# Altium schematic symbol library MY_LIB_Connectors.SchLib: 177 symbols (part 4 of 4)
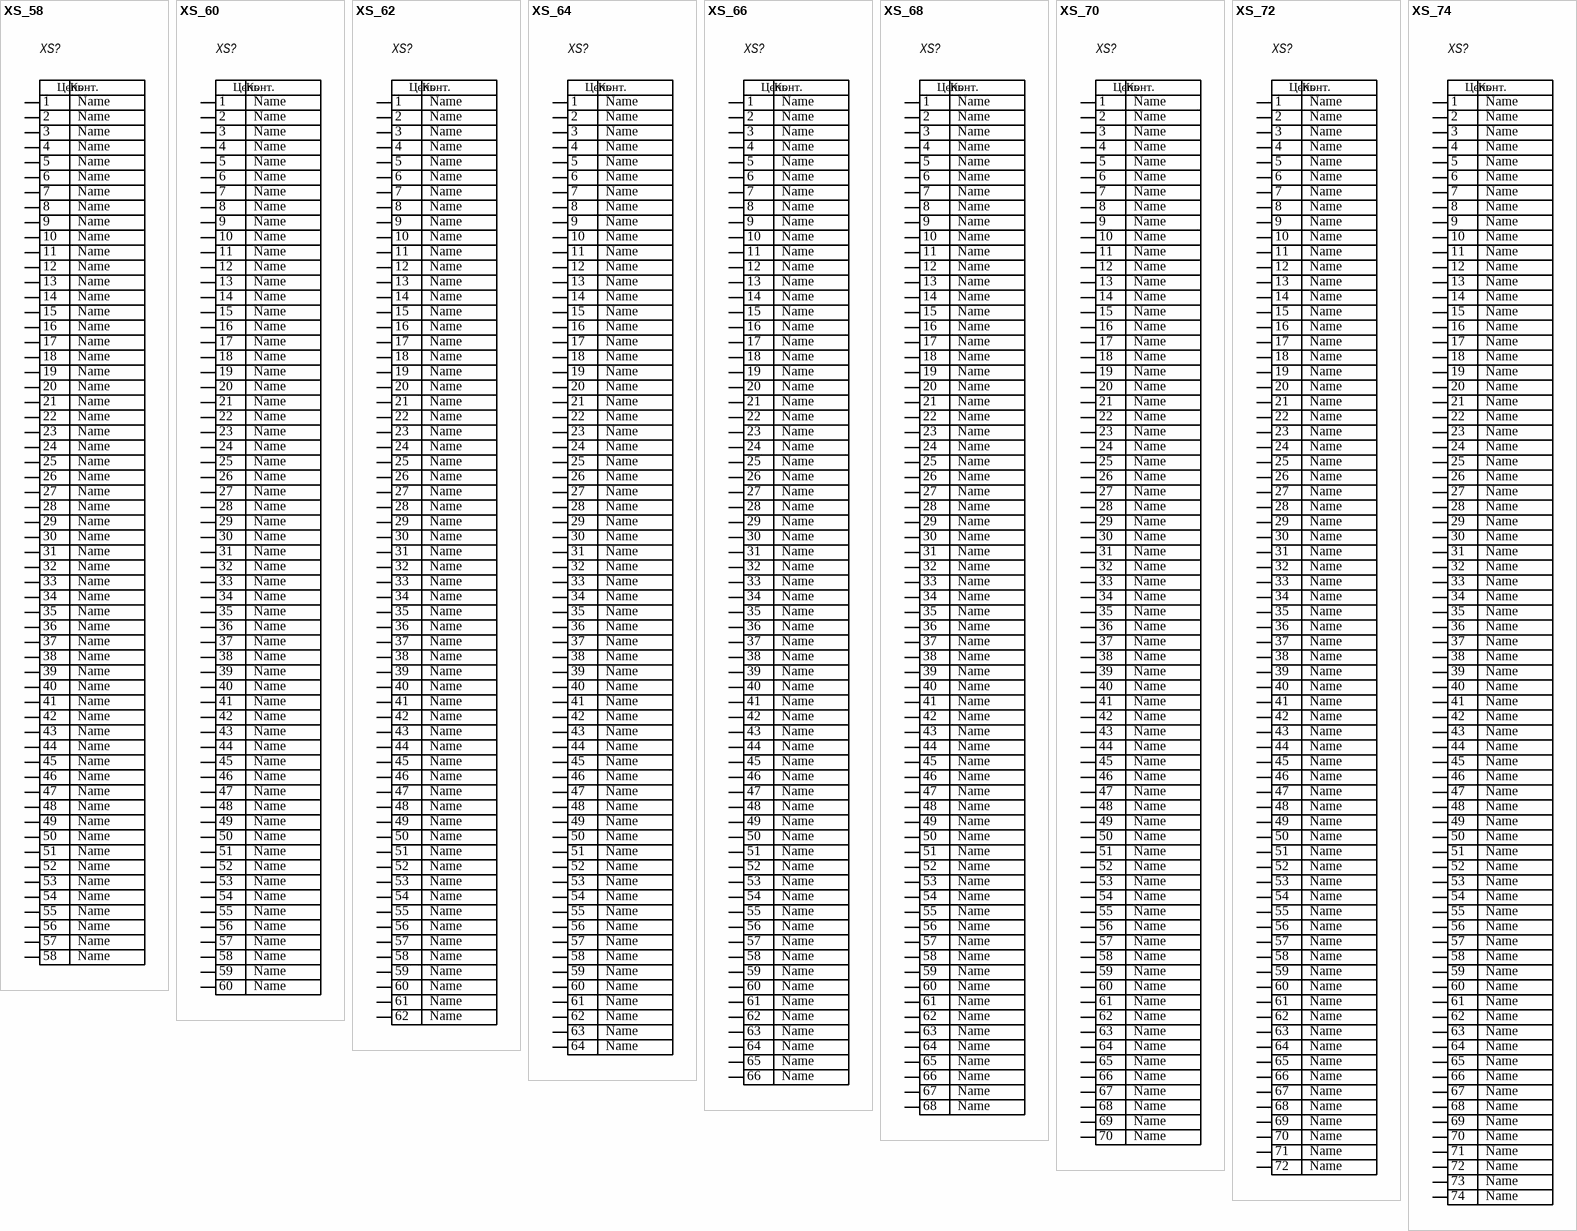
[diagram p12: symbols XS_58 to XS_74]

## XS_66
designator XS?  Pin66_Name: Name  (hidden comment: *)
Generic 66-contact connector; DBUR table style; editable signal names; Value: *; Pin65_Name: Name; Pin64_Name: Name; Pin63_Name: Name; Pin62_Name: Name; Pin61_Name: Name; Pin60_Name: Name; Pin59_Name: Name; Pin58_Name: Name; Pin57_Name: Name; Pin56_Name: Name; Pin55_Name: Name; Pin54_Name: Name; Pin53_Name: Name; Pin52_Name: Name; Pin51_Name: Name; Pin50_Name: Name; Pin49_Name: Name; Pin48_Name: Name; Pin47_Name: Name; Pin46_Name: Name; Pin45_Name: Name; Pin44_Name: Name; Pin43_Name: Name; Pin42_Name: Name; Pin41_Name: Name; Pin40_Name: Name; Pin39_Name: Name; Pin38_Name: Name; Pin37_Name: Name; Pin36_Name: Name; Pin35_Name: Name; Pin34_Name: Name; Pin33_Name: Name; Pin32_Name: Name; Pin31_Name: Name; Pin30_Name: Name; Pin29_Name: Name; Pin28_Name: Name; Pin27_Name: Name; Pin26_Name: Name; Pin25_Name: Name; Pin24_Name: Name; Pin23_Name: Name; Pin22_Name: Name; Pin21_Name: Name; Pin20_Name: Name; Pin19_Name: Name; Pin18_Name: Name; Pin17_Name: Name; Pin16_Name: Name; Pin15_Name: Name; Pin14_Name: Name; Pin13_Name: Name; Pin12_Name: Name; Pin11_Name: Name; Pin10_Name: Name; Pin9_Name: Name; Pin8_Name: Name; Pin7_Name: Name; Pin6_Name: Name; Pin5_Name: Name; Pin4_Name: Name; Pin3_Name: Name; Pin2_Name: Name; Pin1_Name: Name
pins: 1 Name, 2 Name, 3 Name, 4 Name, 5 Name, 6 Name, 7 Name, 8 Name, 9 Name, 10 Name, 11 Name, 12 Name, 13 Name, 14 Name, 15 Name, 16 Name, 17 Name, 18 Name, 19 Name, 20 Name, 21 Name, 22 Name, 23 Name, 24 Name, 25 Name, 26 Name, 27 Name, 28 Name, 29 Name, 30 Name, 31 Name, 32 Name, 33 Name, 34 Name, 35 Name, 36 Name, 37 Name, 38 Name, 39 Name, 40 Name, 41 Name, 42 Name, 43 Name, 44 Name, 45 Name, 46 Name, 47 Name, 48 Name, 49 Name, 50 Name, 51 Name, 52 Name, 53 Name, 54 Name, 55 Name, 56 Name, 57 Name, 58 Name, 59 Name, 60 Name, 61 Name, 62 Name, 63 Name, 64 Name, 65 Name, 66 Name
1 alternate drawing of the same symbol
text: Конт.; Цепь

## XS_68
designator XS?  Pin68_Name: Name  (hidden comment: *)
Generic 68-contact connector; DBUR table style; editable signal names; Value: *; Pin67_Name: Name; Pin66_Name: Name; Pin65_Name: Name; Pin64_Name: Name; Pin63_Name: Name; Pin62_Name: Name; Pin61_Name: Name; Pin60_Name: Name; Pin59_Name: Name; Pin58_Name: Name; Pin57_Name: Name; Pin56_Name: Name; Pin55_Name: Name; Pin54_Name: Name; Pin53_Name: Name; Pin52_Name: Name; Pin51_Name: Name; Pin50_Name: Name; Pin49_Name: Name; Pin48_Name: Name; Pin47_Name: Name; Pin46_Name: Name; Pin45_Name: Name; Pin44_Name: Name; Pin43_Name: Name; Pin42_Name: Name; Pin41_Name: Name; Pin40_Name: Name; Pin39_Name: Name; Pin38_Name: Name; Pin37_Name: Name; Pin36_Name: Name; Pin35_Name: Name; Pin34_Name: Name; Pin33_Name: Name; Pin32_Name: Name; Pin31_Name: Name; Pin30_Name: Name; Pin29_Name: Name; Pin28_Name: Name; Pin27_Name: Name; Pin26_Name: Name; Pin25_Name: Name; Pin24_Name: Name; Pin23_Name: Name; Pin22_Name: Name; Pin21_Name: Name; Pin20_Name: Name; Pin19_Name: Name; Pin18_Name: Name; Pin17_Name: Name; Pin16_Name: Name; Pin15_Name: Name; Pin14_Name: Name; Pin13_Name: Name; Pin12_Name: Name; Pin11_Name: Name; Pin10_Name: Name; Pin9_Name: Name; Pin8_Name: Name; Pin7_Name: Name; Pin6_Name: Name; Pin5_Name: Name; Pin4_Name: Name; Pin3_Name: Name; Pin2_Name: Name; Pin1_Name: Name
pins: 1 Name, 2 Name, 3 Name, 4 Name, 5 Name, 6 Name, 7 Name, 8 Name, 9 Name, 10 Name, 11 Name, 12 Name, 13 Name, 14 Name, 15 Name, 16 Name, 17 Name, 18 Name, 19 Name, 20 Name, 21 Name, 22 Name, 23 Name, 24 Name, 25 Name, 26 Name, 27 Name, 28 Name, 29 Name, 30 Name, 31 Name, 32 Name, 33 Name, 34 Name, 35 Name, 36 Name, 37 Name, 38 Name, 39 Name, 40 Name, 41 Name, 42 Name, 43 Name, 44 Name, 45 Name, 46 Name, 47 Name, 48 Name, 49 Name, 50 Name, 51 Name, 52 Name, 53 Name, 54 Name, 55 Name, 56 Name, 57 Name, 58 Name, 59 Name, 60 Name, 61 Name, 62 Name, 63 Name, 64 Name, 65 Name, 66 Name, 67 Name, 68 Name
1 alternate drawing of the same symbol
text: Конт.; Цепь

## XS_70
designator XS?  Pin70_Name: Name  (hidden comment: *)
Generic 70-contact connector; DBUR table style; editable signal names; Value: *; Pin69_Name: Name; Pin68_Name: Name; Pin67_Name: Name; Pin66_Name: Name; Pin65_Name: Name; Pin64_Name: Name; Pin63_Name: Name; Pin62_Name: Name; Pin61_Name: Name; Pin60_Name: Name; Pin59_Name: Name; Pin58_Name: Name; Pin57_Name: Name; Pin56_Name: Name; Pin55_Name: Name; Pin54_Name: Name; Pin53_Name: Name; Pin52_Name: Name; Pin51_Name: Name; Pin50_Name: Name; Pin49_Name: Name; Pin48_Name: Name; Pin47_Name: Name; Pin46_Name: Name; Pin45_Name: Name; Pin44_Name: Name; Pin43_Name: Name; Pin42_Name: Name; Pin41_Name: Name; Pin40_Name: Name; Pin39_Name: Name; Pin38_Name: Name; Pin37_Name: Name; Pin36_Name: Name; Pin35_Name: Name; Pin34_Name: Name; Pin33_Name: Name; Pin32_Name: Name; Pin31_Name: Name; Pin30_Name: Name; Pin29_Name: Name; Pin28_Name: Name; Pin27_Name: Name; Pin26_Name: Name; Pin25_Name: Name; Pin24_Name: Name; Pin23_Name: Name; Pin22_Name: Name; Pin21_Name: Name; Pin20_Name: Name; Pin19_Name: Name; Pin18_Name: Name; Pin17_Name: Name; Pin16_Name: Name; Pin15_Name: Name; Pin14_Name: Name; Pin13_Name: Name; Pin12_Name: Name; Pin11_Name: Name; Pin10_Name: Name; Pin9_Name: Name; Pin8_Name: Name; Pin7_Name: Name; Pin6_Name: Name; Pin5_Name: Name; Pin4_Name: Name; Pin3_Name: Name; Pin2_Name: Name; Pin1_Name: Name
pins: 1 Name, 2 Name, 3 Name, 4 Name, 5 Name, 6 Name, 7 Name, 8 Name, 9 Name, 10 Name, 11 Name, 12 Name, 13 Name, 14 Name, 15 Name, 16 Name, 17 Name, 18 Name, 19 Name, 20 Name, 21 Name, 22 Name, 23 Name, 24 Name, 25 Name, 26 Name, 27 Name, 28 Name, 29 Name, 30 Name, 31 Name, 32 Name, 33 Name, 34 Name, 35 Name, 36 Name, 37 Name, 38 Name, 39 Name, 40 Name, 41 Name, 42 Name, 43 Name, 44 Name, 45 Name, 46 Name, 47 Name, 48 Name, 49 Name, 50 Name, 51 Name, 52 Name, 53 Name, 54 Name, 55 Name, 56 Name, 57 Name, 58 Name, 59 Name, 60 Name, 61 Name, 62 Name, 63 Name, 64 Name, 65 Name, 66 Name, 67 Name, 68 Name, 69 Name, 70 Name
1 alternate drawing of the same symbol
text: Конт.; Цепь

## XS_72
designator XS?  Pin72_Name: Name  (hidden comment: *)
Generic 72-contact connector; DBUR table style; editable signal names; Value: *; Pin71_Name: Name; Pin70_Name: Name; Pin69_Name: Name; Pin68_Name: Name; Pin67_Name: Name; Pin66_Name: Name; Pin65_Name: Name; Pin64_Name: Name; Pin63_Name: Name; Pin62_Name: Name; Pin61_Name: Name; Pin60_Name: Name; Pin59_Name: Name; Pin58_Name: Name; Pin57_Name: Name; Pin56_Name: Name; Pin55_Name: Name; Pin54_Name: Name; Pin53_Name: Name; Pin52_Name: Name; Pin51_Name: Name; Pin50_Name: Name; Pin49_Name: Name; Pin48_Name: Name; Pin47_Name: Name; Pin46_Name: Name; Pin45_Name: Name; Pin44_Name: Name; Pin43_Name: Name; Pin42_Name: Name; Pin41_Name: Name; Pin40_Name: Name; Pin39_Name: Name; Pin38_Name: Name; Pin37_Name: Name; Pin36_Name: Name; Pin35_Name: Name; Pin34_Name: Name; Pin33_Name: Name; Pin32_Name: Name; Pin31_Name: Name; Pin30_Name: Name; Pin29_Name: Name; Pin28_Name: Name; Pin27_Name: Name; Pin26_Name: Name; Pin25_Name: Name; Pin24_Name: Name; Pin23_Name: Name; Pin22_Name: Name; Pin21_Name: Name; Pin20_Name: Name; Pin19_Name: Name; Pin18_Name: Name; Pin17_Name: Name; Pin16_Name: Name; Pin15_Name: Name; Pin14_Name: Name; Pin13_Name: Name; Pin12_Name: Name; Pin11_Name: Name; Pin10_Name: Name; Pin9_Name: Name; Pin8_Name: Name; Pin7_Name: Name; Pin6_Name: Name; Pin5_Name: Name; Pin4_Name: Name; Pin3_Name: Name; Pin2_Name: Name; Pin1_Name: Name
pins: 1 Name, 2 Name, 3 Name, 4 Name, 5 Name, 6 Name, 7 Name, 8 Name, 9 Name, 10 Name, 11 Name, 12 Name, 13 Name, 14 Name, 15 Name, 16 Name, 17 Name, 18 Name, 19 Name, 20 Name, 21 Name, 22 Name, 23 Name, 24 Name, 25 Name, 26 Name, 27 Name, 28 Name, 29 Name, 30 Name, 31 Name, 32 Name, 33 Name, 34 Name, 35 Name, 36 Name, 37 Name, 38 Name, 39 Name, 40 Name, 41 Name, 42 Name, 43 Name, 44 Name, 45 Name, 46 Name, 47 Name, 48 Name, 49 Name, 50 Name, 51 Name, 52 Name, 53 Name, 54 Name, 55 Name, 56 Name, 57 Name, 58 Name, 59 Name, 60 Name, 61 Name, 62 Name, 63 Name, 64 Name, 65 Name, 66 Name, 67 Name, 68 Name, 69 Name, 70 Name, 71 Name, 72 Name
1 alternate drawing of the same symbol
text: Конт.; Цепь

## XS_74
designator XS?  Pin74_Name: Name  (hidden comment: *)
Generic 74-contact connector; DBUR table style; editable signal names; Value: *; Pin73_Name: Name; Pin72_Name: Name; Pin71_Name: Name; Pin70_Name: Name; Pin69_Name: Name; Pin68_Name: Name; Pin67_Name: Name; Pin66_Name: Name; Pin65_Name: Name; Pin64_Name: Name; Pin63_Name: Name; Pin62_Name: Name; Pin61_Name: Name; Pin60_Name: Name; Pin59_Name: Name; Pin58_Name: Name; Pin57_Name: Name; Pin56_Name: Name; Pin55_Name: Name; Pin54_Name: Name; Pin53_Name: Name; Pin52_Name: Name; Pin51_Name: Name; Pin50_Name: Name; Pin49_Name: Name; Pin48_Name: Name; Pin47_Name: Name; Pin46_Name: Name; Pin45_Name: Name; Pin44_Name: Name; Pin43_Name: Name; Pin42_Name: Name; Pin41_Name: Name; Pin40_Name: Name; Pin39_Name: Name; Pin38_Name: Name; Pin37_Name: Name; Pin36_Name: Name; Pin35_Name: Name; Pin34_Name: Name; Pin33_Name: Name; Pin32_Name: Name; Pin31_Name: Name; Pin30_Name: Name; Pin29_Name: Name; Pin28_Name: Name; Pin27_Name: Name; Pin26_Name: Name; Pin25_Name: Name; Pin24_Name: Name; Pin23_Name: Name; Pin22_Name: Name; Pin21_Name: Name; Pin20_Name: Name; Pin19_Name: Name; Pin18_Name: Name; Pin17_Name: Name; Pin16_Name: Name; Pin15_Name: Name; Pin14_Name: Name; Pin13_Name: Name; Pin12_Name: Name; Pin11_Name: Name; Pin10_Name: Name; Pin9_Name: Name; Pin8_Name: Name; Pin7_Name: Name; Pin6_Name: Name; Pin5_Name: Name; Pin4_Name: Name; Pin3_Name: Name; Pin2_Name: Name; Pin1_Name: Name
pins: 1 Name, 2 Name, 3 Name, 4 Name, 5 Name, 6 Name, 7 Name, 8 Name, 9 Name, 10 Name, 11 Name, 12 Name, 13 Name, 14 Name, 15 Name, 16 Name, 17 Name, 18 Name, 19 Name, 20 Name, 21 Name, 22 Name, 23 Name, 24 Name, 25 Name, 26 Name, 27 Name, 28 Name, 29 Name, 30 Name, 31 Name, 32 Name, 33 Name, 34 Name, 35 Name, 36 Name, 37 Name, 38 Name, 39 Name, 40 Name, 41 Name, 42 Name, 43 Name, 44 Name, 45 Name, 46 Name, 47 Name, 48 Name, 49 Name, 50 Name, 51 Name, 52 Name, 53 Name, 54 Name, 55 Name, 56 Name, 57 Name, 58 Name, 59 Name, 60 Name, 61 Name, 62 Name, 63 Name, 64 Name, 65 Name, 66 Name, 67 Name, 68 Name, 69 Name, 70 Name, 71 Name, 72 Name, 73 Name, 74 Name
1 alternate drawing of the same symbol
text: Конт.; Цепь

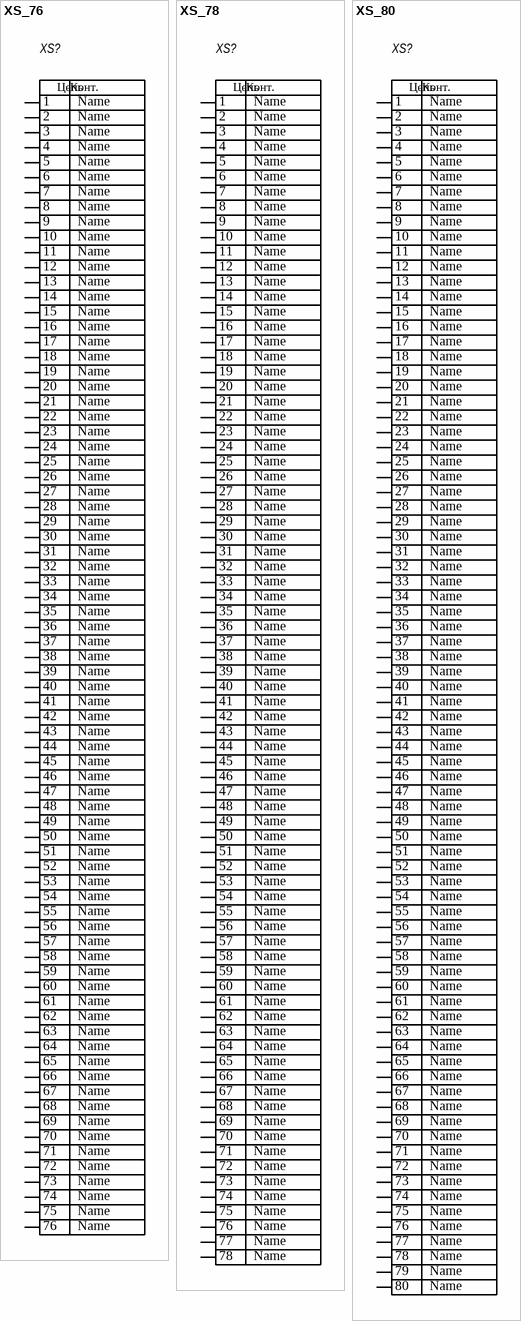
[diagram p9: symbols XS_76 to XS_80]

## XS_76
designator XS?  Pin76_Name: Name  (hidden comment: *)
Generic 76-contact connector; DBUR table style; editable signal names; Value: *; Pin75_Name: Name; Pin74_Name: Name; Pin73_Name: Name; Pin72_Name: Name; Pin71_Name: Name; Pin70_Name: Name; Pin69_Name: Name; Pin68_Name: Name; Pin67_Name: Name; Pin66_Name: Name; Pin65_Name: Name; Pin64_Name: Name; Pin63_Name: Name; Pin62_Name: Name; Pin61_Name: Name; Pin60_Name: Name; Pin59_Name: Name; Pin58_Name: Name; Pin57_Name: Name; Pin56_Name: Name; Pin55_Name: Name; Pin54_Name: Name; Pin53_Name: Name; Pin52_Name: Name; Pin51_Name: Name; Pin50_Name: Name; Pin49_Name: Name; Pin48_Name: Name; Pin47_Name: Name; Pin46_Name: Name; Pin45_Name: Name; Pin44_Name: Name; Pin43_Name: Name; Pin42_Name: Name; Pin41_Name: Name; Pin40_Name: Name; Pin39_Name: Name; Pin38_Name: Name; Pin37_Name: Name; Pin36_Name: Name; Pin35_Name: Name; Pin34_Name: Name; Pin33_Name: Name; Pin32_Name: Name; Pin31_Name: Name; Pin30_Name: Name; Pin29_Name: Name; Pin28_Name: Name; Pin27_Name: Name; Pin26_Name: Name; Pin25_Name: Name; Pin24_Name: Name; Pin23_Name: Name; Pin22_Name: Name; Pin21_Name: Name; Pin20_Name: Name; Pin19_Name: Name; Pin18_Name: Name; Pin17_Name: Name; Pin16_Name: Name; Pin15_Name: Name; Pin14_Name: Name; Pin13_Name: Name; Pin12_Name: Name; Pin11_Name: Name; Pin10_Name: Name; Pin9_Name: Name; Pin8_Name: Name; Pin7_Name: Name; Pin6_Name: Name; Pin5_Name: Name; Pin4_Name: Name; Pin3_Name: Name; Pin2_Name: Name; Pin1_Name: Name
pins: 1 Name, 2 Name, 3 Name, 4 Name, 5 Name, 6 Name, 7 Name, 8 Name, 9 Name, 10 Name, 11 Name, 12 Name, 13 Name, 14 Name, 15 Name, 16 Name, 17 Name, 18 Name, 19 Name, 20 Name, 21 Name, 22 Name, 23 Name, 24 Name, 25 Name, 26 Name, 27 Name, 28 Name, 29 Name, 30 Name, 31 Name, 32 Name, 33 Name, 34 Name, 35 Name, 36 Name, 37 Name, 38 Name, 39 Name, 40 Name, 41 Name, 42 Name, 43 Name, 44 Name, 45 Name, 46 Name, 47 Name, 48 Name, 49 Name, 50 Name, 51 Name, 52 Name, 53 Name, 54 Name, 55 Name, 56 Name, 57 Name, 58 Name, 59 Name, 60 Name, 61 Name, 62 Name, 63 Name, 64 Name, 65 Name, 66 Name, 67 Name, 68 Name, 69 Name, 70 Name, 71 Name, 72 Name, 73 Name, 74 Name, 75 Name, 76 Name
1 alternate drawing of the same symbol
text: Конт.; Цепь

## XS_78
designator XS?  Pin78_Name: Name  (hidden comment: *)
Generic 78-contact connector; DBUR table style; editable signal names; Value: *; Pin77_Name: Name; Pin76_Name: Name; Pin75_Name: Name; Pin74_Name: Name; Pin73_Name: Name; Pin72_Name: Name; Pin71_Name: Name; Pin70_Name: Name; Pin69_Name: Name; Pin68_Name: Name; Pin67_Name: Name; Pin66_Name: Name; Pin65_Name: Name; Pin64_Name: Name; Pin63_Name: Name; Pin62_Name: Name; Pin61_Name: Name; Pin60_Name: Name; Pin59_Name: Name; Pin58_Name: Name; Pin57_Name: Name; Pin56_Name: Name; Pin55_Name: Name; Pin54_Name: Name; Pin53_Name: Name; Pin52_Name: Name; Pin51_Name: Name; Pin50_Name: Name; Pin49_Name: Name; Pin48_Name: Name; Pin47_Name: Name; Pin46_Name: Name; Pin45_Name: Name; Pin44_Name: Name; Pin43_Name: Name; Pin42_Name: Name; Pin41_Name: Name; Pin40_Name: Name; Pin39_Name: Name; Pin38_Name: Name; Pin37_Name: Name; Pin36_Name: Name; Pin35_Name: Name; Pin34_Name: Name; Pin33_Name: Name; Pin32_Name: Name; Pin31_Name: Name; Pin30_Name: Name; Pin29_Name: Name; Pin28_Name: Name; Pin27_Name: Name; Pin26_Name: Name; Pin25_Name: Name; Pin24_Name: Name; Pin23_Name: Name; Pin22_Name: Name; Pin21_Name: Name; Pin20_Name: Name; Pin19_Name: Name; Pin18_Name: Name; Pin17_Name: Name; Pin16_Name: Name; Pin15_Name: Name; Pin14_Name: Name; Pin13_Name: Name; Pin12_Name: Name; Pin11_Name: Name; Pin10_Name: Name; Pin9_Name: Name; Pin8_Name: Name; Pin7_Name: Name; Pin6_Name: Name; Pin5_Name: Name; Pin4_Name: Name; Pin3_Name: Name; Pin2_Name: Name; Pin1_Name: Name
pins: 1 Name, 2 Name, 3 Name, 4 Name, 5 Name, 6 Name, 7 Name, 8 Name, 9 Name, 10 Name, 11 Name, 12 Name, 13 Name, 14 Name, 15 Name, 16 Name, 17 Name, 18 Name, 19 Name, 20 Name, 21 Name, 22 Name, 23 Name, 24 Name, 25 Name, 26 Name, 27 Name, 28 Name, 29 Name, 30 Name, 31 Name, 32 Name, 33 Name, 34 Name, 35 Name, 36 Name, 37 Name, 38 Name, 39 Name, 40 Name, 41 Name, 42 Name, 43 Name, 44 Name, 45 Name, 46 Name, 47 Name, 48 Name, 49 Name, 50 Name, 51 Name, 52 Name, 53 Name, 54 Name, 55 Name, 56 Name, 57 Name, 58 Name, 59 Name, 60 Name, 61 Name, 62 Name, 63 Name, 64 Name, 65 Name, 66 Name, 67 Name, 68 Name, 69 Name, 70 Name, 71 Name, 72 Name, 73 Name, 74 Name, 75 Name, 76 Name, 77 Name, 78 Name
1 alternate drawing of the same symbol
text: Конт.; Цепь

## XS_80
designator XS?  Pin80_Name: Name  (hidden comment: *)
Generic 80-contact connector; DBUR table style; editable signal names; Value: *; Pin79_Name: Name; Pin78_Name: Name; Pin77_Name: Name; Pin76_Name: Name; Pin75_Name: Name; Pin74_Name: Name; Pin73_Name: Name; Pin72_Name: Name; Pin71_Name: Name; Pin70_Name: Name; Pin69_Name: Name; Pin68_Name: Name; Pin67_Name: Name; Pin66_Name: Name; Pin65_Name: Name; Pin64_Name: Name; Pin63_Name: Name; Pin62_Name: Name; Pin61_Name: Name; Pin60_Name: Name; Pin59_Name: Name; Pin58_Name: Name; Pin57_Name: Name; Pin56_Name: Name; Pin55_Name: Name; Pin54_Name: Name; Pin53_Name: Name; Pin52_Name: Name; Pin51_Name: Name; Pin50_Name: Name; Pin49_Name: Name; Pin48_Name: Name; Pin47_Name: Name; Pin46_Name: Name; Pin45_Name: Name; Pin44_Name: Name; Pin43_Name: Name; Pin42_Name: Name; Pin41_Name: Name; Pin40_Name: Name; Pin39_Name: Name; Pin38_Name: Name; Pin37_Name: Name; Pin36_Name: Name; Pin35_Name: Name; Pin34_Name: Name; Pin33_Name: Name; Pin32_Name: Name; Pin31_Name: Name; Pin30_Name: Name; Pin29_Name: Name; Pin28_Name: Name; Pin27_Name: Name; Pin26_Name: Name; Pin25_Name: Name; Pin24_Name: Name; Pin23_Name: Name; Pin22_Name: Name; Pin21_Name: Name; Pin20_Name: Name; Pin19_Name: Name; Pin18_Name: Name; Pin17_Name: Name; Pin16_Name: Name; Pin15_Name: Name; Pin14_Name: Name; Pin13_Name: Name; Pin12_Name: Name; Pin11_Name: Name; Pin10_Name: Name; Pin9_Name: Name; Pin8_Name: Name; Pin7_Name: Name; Pin6_Name: Name; Pin5_Name: Name; Pin4_Name: Name; Pin3_Name: Name; Pin2_Name: Name; Pin1_Name: Name
pins: 1 Name, 2 Name, 3 Name, 4 Name, 5 Name, 6 Name, 7 Name, 8 Name, 9 Name, 10 Name, 11 Name, 12 Name, 13 Name, 14 Name, 15 Name, 16 Name, 17 Name, 18 Name, 19 Name, 20 Name, 21 Name, 22 Name, 23 Name, 24 Name, 25 Name, 26 Name, 27 Name, 28 Name, 29 Name, 30 Name, 31 Name, 32 Name, 33 Name, 34 Name, 35 Name, 36 Name, 37 Name, 38 Name, 39 Name, 40 Name, 41 Name, 42 Name, 43 Name, 44 Name, 45 Name, 46 Name, 47 Name, 48 Name, 49 Name, 50 Name, 51 Name, 52 Name, 53 Name, 54 Name, 55 Name, 56 Name, 57 Name, 58 Name, 59 Name, 60 Name, 61 Name, 62 Name, 63 Name, 64 Name, 65 Name, 66 Name, 67 Name, 68 Name, 69 Name, 70 Name, 71 Name, 72 Name, 73 Name, 74 Name, 75 Name, 76 Name, 77 Name, 78 Name, 79 Name, 80 Name
1 alternate drawing of the same symbol
text: Конт.; Цепь